# Altium footprint library Transistor$.PcbLib: 22 footprints (part 1 of 2)
Each footprint in its own frame and in the unit in brackets; x right, y up, seen from the top. Pads: shape width x height; smd on the part's side, far side on the other; paste and mask are expansions set on the pad; w line width, h text height; cw(c..) or ccw(c..) is an arc to the next point about the centre after c.
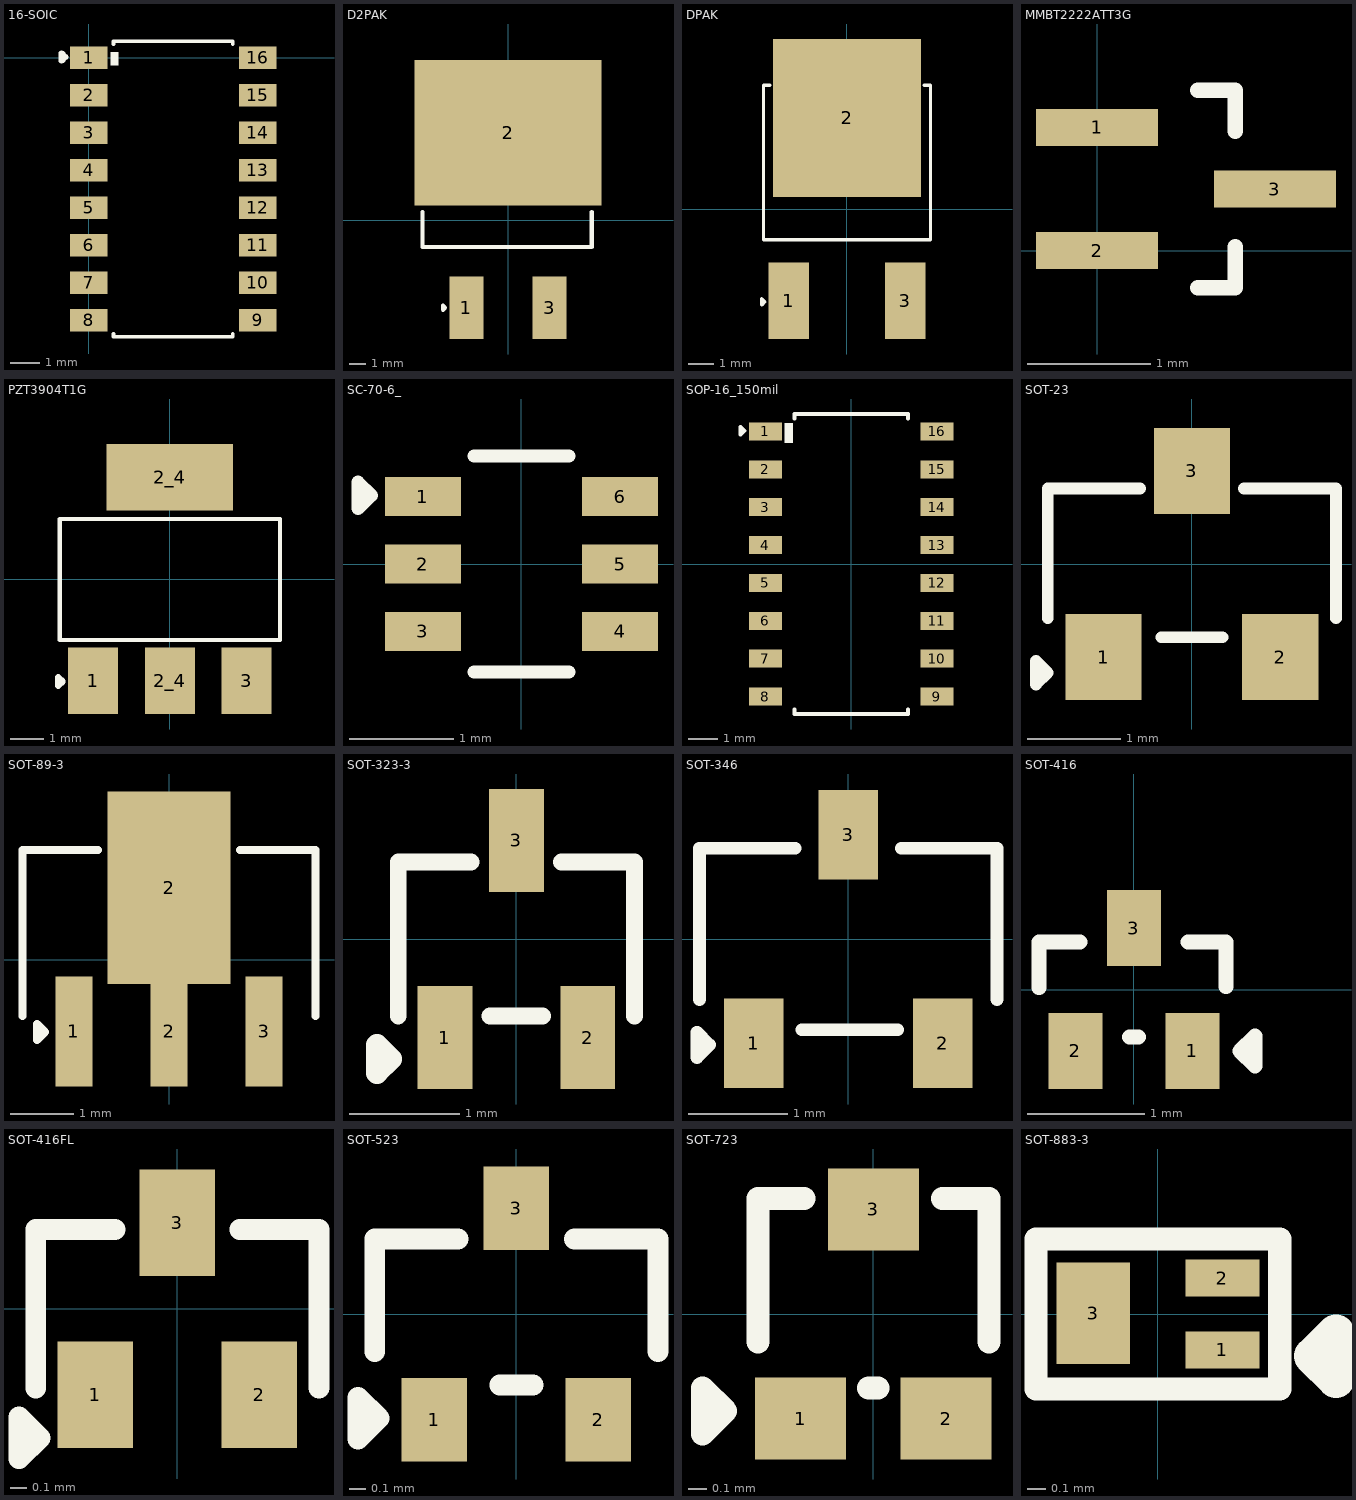
[diagram p0: the footprints below, top view; thin cyan lines are the x and y axes]

## 16-SOIC [mm]
pads (16):
  rect 1.27x0.76 smd: 1(0,0) 2(0,-1.27) 3(0,-2.54) 4(0,-3.81) 5(0,-5.08) 6(0,-6.35) 7(0,-7.62) 8(0,-8.89) 9(5.72,-8.89) 10(5.72,-7.62) 11(5.72,-6.35) 12(5.72,-5.08) 13(5.72,-3.81) 14(5.72,-2.54) 15(5.72,-1.27) 16(5.72,0)
Top Overlay:
  rectangle: 0.737,-0.254 1.016,0.203
  lines w0.127: 0.838,-9.347 0.838,-9.449 4.877,-9.449 ; 0.838,0.457 0.838,0.559 4.877,0.559 ; 4.882,-9.447 4.882,-9.347 ; 4.882,0.457 4.882,0.557
  lines w0.2: -0.914,-0.102 -0.787,0.025 -0.914,0.152 -0.914,-0.102
3D body "MAX14850ASE+.STEP": height 1.75, standoff 0, extent -0.14,-9.395 5.86,0.505

## D2PAK [mm]
pads (3):
  rect 2.08x3.81 smd: 1(-2.54,-5.335) 3(2.54,-5.335)
  rect 11.43x8.89 smd: 2(0,5.335)
Top Overlay:
  lines w0.254: -5.207,0.508 -5.207,-1.626 5.105,-1.626 5.105,0.508 ; -3.962,-5.461 -3.835,-5.334 -3.962,-5.207 -3.962,-5.461
3D body "pwr263s-35-8r20f.stp": height 4.5, standoff 0, extent -5.075,-6.596 5.025,8.794

## DPAK [mm]
pads (3):
  rect 1.6x3 smd: 1(-2.285,-3.59) 3(2.285,-3.59)
  rect 5.8x6.2 smd: 2(0,3.59)
Top Overlay:
  lines w0.127: -3.023,4.877 -3.277,4.877 -3.277,-1.194 3.277,-1.194 3.277,4.877 3.023,4.877 ; -3.353,-3.759 -3.353,-3.505 -3.226,-3.632 -3.353,-3.759
3D body "MC7805BDTRKG.STEP": height 2.51, standoff -0.01, extent -3.277,-3.988 3.223,5.918

## MMBT2222ATT3G [mm]
pads (3):
  rect 0.99x0.3 smd: 1(0,1) 2(0,0) 3(1.44,0.5)
Top Overlay:
  lines w0.127: 0.815,-0.3 1.12,-0.3 1.12,0.03 ; 0.815,1.3 1.12,1.3 1.12,0.97
3D body "step_temp.STEP": height 0.9, standoff 0, extent -0.08,-0.3 1.52,1.3

## PZT3904T1G [mm]
pads (4):
  rect 1.5x2 smd: 1(-2.3,-3.05) 2_4(0,-3.05) 3(2.3,-3.05)
  rect 3.8x2 smd: 2_4(0,3.05)
Top Overlay:
  lines w0.127: -3.302,-1.829 -3.302,1.803 3.302,1.803 3.302,-1.829 -3.302,-1.829
  lines w0.2: -3.353,-3.2 -3.353,-2.946 -3.226,-3.073 -3.353,-3.2
3D body "User Library-SOT-223-1.step": height 1.61, standoff -0.04, extent -3.25,-3.5 3.25,3.5

## SC-70-6_ [mm]
pads (6):
  rect 0.73x0.38 smd: 1(-0.95,0.65) 2(-0.95,0) 3(-0.95,-0.65) 4(0.95,-0.65) 5(0.95,0) 6(0.95,0.65)
Top Overlay:
  lines w0.127: -0.457,-1.041 0.457,-1.041 ; -0.457,1.041 0.457,1.041 ; -1.575,0.533 -1.575,0.787 -1.448,0.66 -1.575,0.533
3D body "User Library-SC70-6.step": height 0.92, standoff -0.03, extent -1.05,-1 1.05,1

## SOP-16_150mil [mm]
pads (16):
  rect 1.1x0.6 smd: 1(-2.875,4.445) 2(-2.875,3.175) 3(-2.875,1.905) 4(-2.875,0.635) 5(-2.875,-0.635) 6(-2.875,-1.905) 7(-2.875,-3.175) 8(-2.875,-4.445) 9(2.875,-4.445) 10(2.875,-3.175) 11(2.875,-1.905) 12(2.875,-0.635) 13(2.875,0.635) 14(2.875,1.905) 15(2.875,3.175) 16(2.875,4.445)
Top Overlay:
  rectangle: -2.235,4.064 -1.956,4.724
  lines w0.127: -1.905,-4.877 -1.905,-5.029 1.905,-5.029 1.905,-4.877 ; -1.905,4.877 -1.905,5.029 1.905,5.029 1.905,4.877 ; -3.708,4.343 -3.708,4.597 -3.581,4.47 -3.708,4.343
3D body "User Library-SOIC127P600X175-16.step": height 1.62, standoff -0.03, extent -3.04,-5 3.04,5

## SOT-23 [mm] "TRANS NPN 40V 0.6A SOT23"
pads (3):
  rect 0.82x0.92 smd: 1(-0.95,-1) 2(0.95,-1) 3(0,1)
Top Overlay:
  lines w0.127: -1.549,-0.584 -1.549,0.813 -0.559,0.813 ; -0.33,-0.787 0.33,-0.787 ; 0.559,0.813 1.549,0.813 1.549,-0.584 ; -1.676,-1.295 -1.676,-1.041 -1.549,-1.168 -1.676,-1.295
3D body "CircuitWorks-SOT-23.step": height 1.05, standoff -0.05, extent -1.5,-1.25 1.5,1.25

## SOT-89-3 [mm]
pads (4):
  rect 0.58x1.73 smd: 1(-1.5,-1.132) 2(0,-1.132) 3(1.5,-1.132)
  rect 1.933x3.03 smd: 2(0,1.132)
Top Overlay:
  lines w0.127: -2.311,-0.889 -2.311,1.727 -1.118,1.727 ; 1.118,1.727 2.311,1.727 2.311,-0.889 ; -2.083,-1.27 -2.083,-1.016 -1.956,-1.143 -2.083,-1.27
3D body "User Library-SOT89-3.STEP": height 1.54, standoff 0, extent -2.25,-1.844 2.25,2.406

## SOT-323-3 [mm]
pads (3):
  rect 0.5x0.936 smd: 1(-0.65,-0.898) 2(0.65,-0.898) 3(0,0.898)
Top Overlay:
  lines w0.152: -1.075,-0.701 -1.075,0.701 -0.411,0.701 ; -0.239,-0.701 0.239,-0.701 ; 0.411,0.701 1.075,0.701 1.075,-0.701
  lines w0.2: -1.27,-1.219 -1.143,-1.092 -1.27,-0.965 -1.27,-1.219
3D body "PDTC114EU_115.step": height 1.1, standoff 0, extent -1,-1.05 1,1.05

## SOT-346 [mm]
pads (3):
  rect 0.6x0.9 smd: 1(-0.95,-1.05) 2(0.95,-1.05) 3(0,1.05)
Top Overlay:
  lines w0.127: -1.499,-0.61 -1.499,0.914 -0.533,0.914 ; -0.467,-0.914 0.498,-0.914 ; 0.533,0.914 1.499,0.914 1.499,-0.61 ; -1.524,-1.194 -1.397,-1.067 -1.524,-0.94 -1.524,-1.194
3D body "TRANS_2SB852K_ROM.step": height 1.3, standoff 0, extent -1.448,-1.397 1.448,1.397

## SOT-416 [mm]
pads (3):
  rect 0.46x0.65 smd: 1(0.5,-0.525) 2(-0.5,-0.525) 3(0,0.525)
Top Overlay:
  lines w0.127: -0.813,0.016 -0.813,0.406 -0.461,0.406 ; -0.039,-0.406 0.039,-0.406 ; 0.461,0.406 0.787,0.406 0.787,0.024 ; 0.907,-0.525 1.034,-0.398 1.034,-0.652 0.907,-0.525
3D body "C111728.step": height 0.75, standoff 0, extent -0.8,-0.8 0.8,0.8

## SOT-416FL [mm]
pads (3):
  rect 0.46x0.65 smd: 1(-0.5,-0.525) 2(0.5,-0.525) 3(0,0.525)
Top Overlay:
  lines w0.127: -0.864,-0.483 -0.864,0.483 -0.381,0.483 ; 0.381,0.483 0.864,0.483 0.864,-0.483 ; -0.965,-0.914 -0.838,-0.787 -0.965,-0.66 -0.965,-0.914
3D body "TRANS_2SC4617EB_ROM.step": height 0.89, standoff 0, extent -0.8,-0.851 0.8,0.851

## SOT-523 [mm]
pads (3):
  rect 0.4x0.51 smd: 1(-0.5,-0.645) 2(0.5,-0.645) 3(0,0.645)
Top Overlay:
  lines w0.127: -0.864,-0.229 -0.864,0.457 -0.356,0.457 ; -0.102,-0.432 0.102,-0.432 ; 0.356,0.457 0.864,0.457 0.864,-0.229 ; -0.965,-0.762 -0.838,-0.635 -0.965,-0.508 -0.965,-0.762
3D body "User Library-SOT-523.step": height 0.8, standoff 0, extent -0.8,-0.8 0.8,0.8

## SOT-723 [mm]
pads (3):
  rect 0.5x0.45 smd: 1(-0.4,-0.575) 2(0.4,-0.575) 3(0,0.575)
Top Overlay:
  lines w0.127: -0.025,-0.406 0.025,-0.406 ; 0.381,0.635 0.635,0.635 0.635,-0.152 ; -0.635,0.635 -0.381,0.635 -0.635,0.635 ; -0.635,0.635 -0.635,-0.152 -0.635,0.635 ; -0.94,-0.66 -0.813,-0.533 -0.94,-0.406 -0.94,-0.66
3D body "VESM.STEP": height 0.5, standoff 0, extent -0.6,-0.6 0.6,0.6

## SOT-883-3 [mm]
pads (3):
  rect 0.4x0.2 smd paste+0 mask+0.05: 1(0.35,-0.195) 2(0.35,0.195)
  rect 0.4x0.55 smd paste+0 mask+0.05: 3(-0.35,0.005)
Top Overlay:
  lines w0.127: -0.66,-0.406 -0.66,0.406 0.66,0.406 0.66,-0.406 -0.66,-0.406
  lines w0.2: 0.838,-0.229 0.965,-0.102 0.965,-0.356 0.838,-0.229
3D body "User Library-SOT883.step": height 0.48, standoff -0.03, extent -0.493,-0.292 0.493,0.292